# Altium schematic symbol library Resistor.SchLib: 1085 symbols (part 22 of 29)
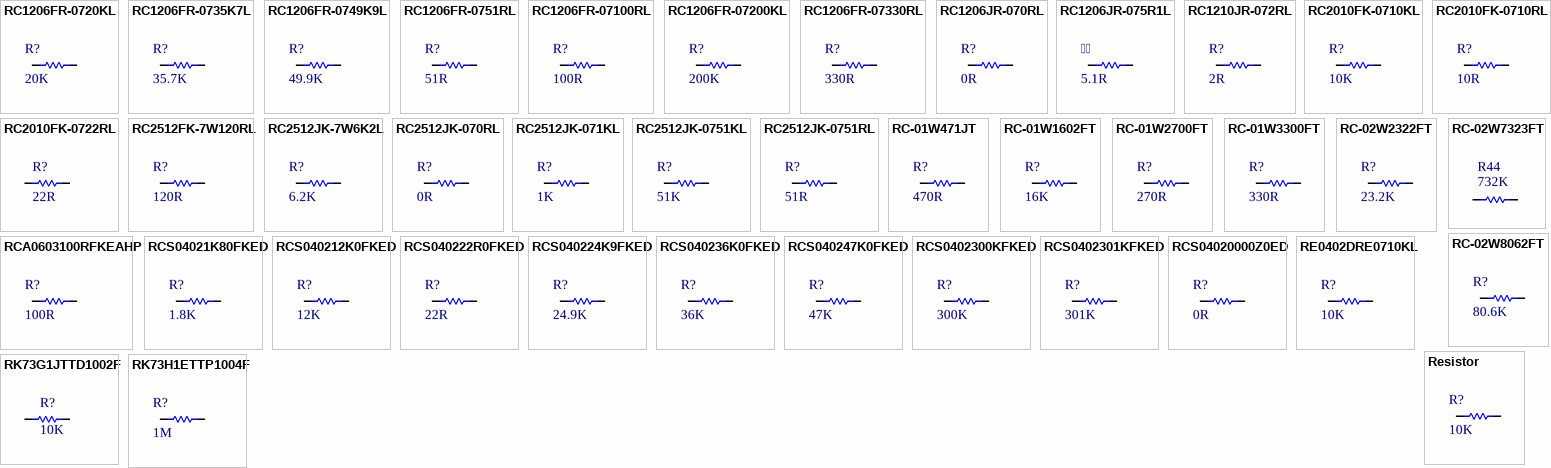
[diagram p48: symbols RC1206FR-0720KL to RK73H1ETTP1004F]

## RC2010FK-0710RL
designator R?, comment 10R
RES 10 OHM 1% 3/4W 2010; Manufacturer: Yageo; Manufacturer Part Number: RC2010FK-0710RL; Item Type: Resistors; Supplier: Future Electronics; LCSC Part Number: C137067; RoHS: Yes; Stock: 8000; Pricing: 4000=0.041, 12000=0.0395, 20000=0.0388, 60000=0.0374, 100000=0.0362 (USD); ComponentLink1URL: https://datasheet.ciiva.com/12667/pyu-rc2010-51-rohs-l-4-12667047.pdf?src-supplier=Mouser; ComponentLink1Description: https://datasheet.ciiva.com/12667/pyu-rc2010-51-rohs-l-4-12667047.pdf?src-supplier=Mouser; ComponentLink2URL: https://datasheet.ciiva.com/7672/1563630-7672315.pdf?src-supplier=Element14; ComponentLink2Description: https://datasheet.ciiva.com/7672/1563630-7672315.pdf?src-supplier=Element14; ComponentLink3URL: https://datasheet.ciiva.com/7672/1563630-7672316.pdf?src-supplier=Element14; ComponentLink3Description: https://datasheet.ciiva.com/7672/1563630-7672316.pdf?src-supplier=Element14; ComponentLink4URL: https://datasheet.ciiva.com/17422/pyu-rc2010-51-rohs-l-4-17422060.pdf?src-supplier=Future+Electronics; ComponentLink4Description: https://datasheet.ciiva.com/17422/pyu-rc2010-51-rohs-l-4-17422060.pdf?src-supplier=Future+Electronics
footprint RES-2010
pins: 1, 2

## RC2010FK-0722RL
designator R?, comment 22R
RES 22 OHM 1% 3/4W 2010; Manufacturer: Yageo; Manufacturer Part Number: RC2010FK-0722RL; Supplier: Digikey; Supplier Part Number: 13-RC2010FK-0722RLCT-ND; RoHS: Yes; Category: Chip SMD Resistors; Stock: 4110; Pricing: 1=0.22, 10=0.082, 50=0.0668, 100=0.052, 500=0.04386, 1000=0.0357 (USD); ComponentLink1URL: https://datasheet.ciiva.com/23789/442877-23789760.pdf?src-supplier=Newark; ComponentLink1Description: https://datasheet.ciiva.com/23789/442877-23789760.pdf?src-supplier=Newark; ComponentLink2URL: https://datasheet.ciiva.com/7672/1563630-7672331.pdf?src-supplier=Element14; ComponentLink2Description: https://datasheet.ciiva.com/7672/1563630-7672331.pdf?src-supplier=Element14; ComponentLink3URL: https://datasheet.ciiva.com/7672/1563630-7672332.pdf?src-supplier=Element14; ComponentLink3Description: https://datasheet.ciiva.com/7672/1563630-7672332.pdf?src-supplier=Element14; ComponentLink4URL: https://datasheet.ciiva.com/8890/pyu-rc2010-51-rohs-l-4-8890167.pdf?src-supplier=Avnet; ComponentLink4Description: https://datasheet.ciiva.com/8890/pyu-rc2010-51-rohs-l-4-8890167.pdf?src-supplier=Avnet
footprint RES-2010
pins: 1, 2

## RC2512FK-7W120RL
designator R?, comment 120R
RES 120 OHM 1% 2W 2512
footprint RES-2512
pins: 1, 2

## RC2512JK-7W6K2L
designator R?, comment 6.2K
RES 6.2K OHM 5% 2W 2512; Manufacturer: Yageo; Manufacturer Part Number: RC2512JK-7W6K2L; Item Type: Resistors; Supplier: Digikey; LCSC Part Number: C136991; RoHS: Yes; Pricing: 4000=0.07843 (USD)
footprint RES-2512
pins: 1, 2

## RC2512JK-070RL
designator R?, comment 0R
RES 0 OHM JUMPER 1W 2512; Manufacturer: Yageo; Manufacturer Part Number: RC2512JK-070RL; Item Type: Resistor; Supplier: Digikey; LCSC Part Number: C189505; RoHS: Yes; Stock: 90391; Pricing: 1=0.31, 10=0.251, 25=0.192, 50=0.1392, 100=0.0979, 250=0.0792, 500=0.0624, 1000=0.0432 (USD); Lead Free: 5697LeadFree; ComponentLink1URL: https://datasheet.ciiva.com/7672/1699814-7672026.pdf?src-supplier=Element14; ComponentLink1Description: https://datasheet.ciiva.com/7672/1699814-7672026.pdf?src-supplier=Element14; ComponentLink2URL: https://datasheet.ciiva.com/7672/1699814-7672027.pdf?src-supplier=Element14; ComponentLink2Description: https://datasheet.ciiva.com/7672/1699814-7672027.pdf?src-supplier=Element14; ComponentLink3URL: https://datasheet.ciiva.com/17205/pyu-rc2512-51-rohs-l-4-17205257.pdf?src-supplier=Future+Electronics; ComponentLink3Description: https://datasheet.ciiva.com/17205/pyu-rc2512-51-rohs-l-4-17205257.pdf?src-supplier=Future+Electronics
footprint RES-2512
pins: 1, 2

## RC2512JK-071KL
designator R?, comment 1K
RES 1K OHM 5% 1W 2512; Manufacturer: Yageo; Manufacturer Part Number: RC2512JK-071KL; Value: 1kR; Voltage Rating: 200V; Temperature Coefficient: 100ppm/°C; Item Type: Resistor; Supplier: Future Electronics; Supplier Part Number: 9067984; RoHS: Yes; Category: Chip SMD Resistors; Stock: 596000; Pricing: 4000=0.0216, 16000=0.0207, 40000=0.0201, 100000=0.0195, 160000=0.0187 (USD); Case/Package: 2512; Case Code (Imperial): 2512; Case Code (Metric): 6432; Contact Plating: Tin,Lead; Min Operating Temperature: -55°C; Max Operating Temperature: 155°C; Power Rating: 1W; Packaging: Tape and Reel; Tolerance: 5%; Resistor Type: Thick Film; Number of Terminations: 2; Termination: SMD/SMT; Max Power Dissipation: 1W; Working Voltage: 200V; Features: Moisture Resistant; Series: RC; Technology: THICK FILM; Resistance Tolerance: 5%; Length: 0.25inch; Width: 3.1mm; Height: 0.026inch; RoHS Compliant: Yes; Reach SVHC Compliant: Unknown; Lead Free: 5697LeadFree; ComponentLink1URL: https://datasheet.ciiva.com/5595/pyu-rc2512-51-rohs-l-4-5595927.pdf?src-supplier=Mouser; ComponentLink1Description: https://datasheet.ciiva.com/5595/pyu-rc2512-51-rohs-l-4-5595927.pdf?src-supplier=Mouser; ComponentLink2URL: https://datasheet.ciiva.com/7672/638316-7672039.pdf?src-supplier=Element14; ComponentLink2Description: https://datasheet.ciiva.com/7672/638316-7672039.pdf?src-supplier=Element14; ComponentLink3URL: https://datasheet.ciiva.com/7672/638316-7672038.pdf?src-supplier=Element14; ComponentLink3Description: https://datasheet.ciiva.com/7672/638316-7672038.pdf?src-supplier=Element14; LCSC Part Number: C137010
footprint RES-2512
pins: 1, 2

## RC2512JK-0751KL
designator R?, comment 51K
RES 51K OHM 5% 1W 2512; Manufacturer: Yageo; Manufacturer Part Number: RC2512JK-0751KL; Item Type: Resistors; Supplier: Mouser; LCSC Part Number: C309618; RoHS: Yes; Stock: 8539; Pricing: 1=0.2, 10=0.092, 50=0.089, 100=0.077, 1000=0.053, 10000=0.03 (USD); ComponentLink1URL: https://datasheet.ciiva.com/12560/pyu-rc2512-51-rohs-l-4-12560603.pdf?src-supplier=Mouser; ComponentLink1Description: https://datasheet.ciiva.com/12560/pyu-rc2512-51-rohs-l-4-12560603.pdf?src-supplier=Mouser
footprint RES-2512
pins: 1, 2

## RC2512JK-0751RL
designator R?, comment 51R
1W Thick Film Resistors 200V ±100ppm/℃ ±5% 51Ω 2512 Chip Resistor - Surface Mount ROHS; Manufacturer: YAGEO; Manufacturer Part Number: RC2512JK-0751RL; Package: 2512; LCSC Part Number: C136999; Item Type: Resistor; ComponentLink1Description: LCSC; ComponentLink1URL: https://www.lcsc.com/product-detail/Chip-Resistor-Surface-Mount_YAGEO-RC2512JK-0751RL_C136999.html
footprint RES-2512
pins: 1, 2

## RC-01W471JT
designator R?, comment 470R
50mW ±5% ±200ppm/℃ 470Ω 0201 Chip Resistor - Surface Mount ROHS; Manufacturer: FH; Manufacturer Part Number: RC-01W471JT; Package: 0201; LCSC Part Number: C304545; Item Type: Resistor; ComponentLink1Description: LCSC; ComponentLink1URL: https://www.lcsc.com/product-detail/Chip-Resistor-Surface-Mount_FH-Guangdong-Fenghua-Advanced-Tech-RC-01W471JT_C304545.html
footprint Res-0201
pins: 1, 2

## RC-01W1602FT
designator R?, comment 16K
50mW Thick Film Resistors 25V ±1% ±200ppm/℃ 16kΩ 0201 Chip Resistor - Surface Mount ROHS; Manufacturer: FH (Guangdong Fenghua Advanced Tech); Manufacturer Part Number: RC-01W1602FT; Package: 0201; LCSC Part Number: C320708; Item Type: Resistor; ComponentLink1Description: LCSC; ComponentLink1URL: https://www.lcsc.com/product-detail/Chip-Resistor-Surface-Mount_FH-Guangdong-Fenghua-Advanced-Tech-RC-01W1602FT_C320708.html
footprint Res-0201
pins: 1, 2

## RC-01W2700FT
designator R?, comment 270R
50mW Thick Film Resistors 25V ±1% ±200ppm/℃ 270Ω 0201 Chip Resistor - Surface Mount ROHS; Manufacturer: FH (Guangdong Fenghua Advanced Tech); Manufacturer Part Number: RC-01W2700FT; Package: 0201; LCSC Part Number: C320795; Item Type: Resistor; ComponentLink1Description: LCSC; ComponentLink1URL: https://www.lcsc.com/product-detail/Chip-Resistor-Surface-Mount_FH-Guangdong-Fenghua-Advanced-Tech-RC-01W2700FT_C320795.html
footprint Res-0201
pins: 1, 2

## RC-01W3300FT
designator R?, comment 330R
50mW ±1% ±200ppm/℃ 330Ω 0201 Chip Resistor - Surface Mount ROHS; Manufacturer: FH; Manufacturer Part Number: RC-01W3300FT; Footprint: 0201; ComponentLink1Description: LCSC; ComponentLink1URL: https://www.lcsc.com/product-detail/Chip-Resistor-Surface-Mount_FH-Guangdong-Fenghua-Advanced-Tech-RC-01W3300FT_C320833.html; LCSC Part Number: C320833; Item Type: Resistor
footprint Res-0201
pins: 1, 2

## RC-02W2322FT
designator R?, comment 23.2K
62.5mW Thick Film Resistors 50V ±1% ±200ppm/℃ 23.2kΩ 0402 Chip Resistor - Surface Mount ROHS; Manufacturer: FH; Manufacturer Part Number: RC-02W2322FT; Package: 0402; LCSC Part Number: C321384; Item Type: Resistor; ComponentLink1Description: JLCPCB; ComponentLink1URL: https://jlcpcb.com/partdetail/302289-RC02W2322FT/C321384
footprint Res-0402
pins: 1, 2

## RC-02W7323FT
designator R44, comment 732K
62.5mW Thick Film Resistors ±1% ±200ppm/℃ 732kΩ 0402 Chip Resistor - Surface Mount ROHS; Manufacturer: FH (Guangdong Fenghua Advanced Tech); Manufacturer Part Number: RC-02W7323FT; Package: Res-0402; JLCPCB Part Number: C321608; Item Type: Resistor
footprint Res-0402
pins: 1, 2

## RC-02W8062FT
designator R?, comment 80.6K
1/16W 50V ±1% ±200ppm/℃ -55℃~+155℃ 80.6kΩ 0402 Chip Resistor - Surface Mount ROHS; Manufacture Part Number: RC-02W8062FT; Manufacturer: FH; Footprint: 0402; Value: 80.6K; ComponentLink1Description: LCSC; ComponentLink1URL: https://www.lcsc.com/product-detail/Chip-Resistor-Surface-Mount_FH-Guangdong-Fenghua-Advanced-Tech-RC-02W8062FT_C304637.html; LCSC Part Number: C304637; Item Type: Resistor
footprint Res-0402
pins: 1, 2

## RCA0603100RFKEAHP
designator R?, comment 100R
RES SMD 100 OHM 1% 1/4W 0603; Manufacturer: Vishay Dale; Manufacturer Part Number: RCA0603100RFKEAHP; Max Power Dissipation: 250mW; Temperature Coefficient: 100ppm/°C; Supplier 1: Digi-Key; Stock 1: 0; Case/Package: 0603; Case Code (Imperial): 0603; Case Code (Metric): 1608; Min Operating Temperature: -55°C; Max Operating Temperature: 155°C; Resistor Type: Thick Film; Features: Automotive AEC-Q200,Anti-Sulfur; Packaging: Tape and Reel; Resistance: 100R; Tolerance: 1%; Number of Terminations: 2; RoHS Compliant: Yes; ComponentLink1URL: http://www.vishay.com/docs/20067/rcahp.pdf?src-supplier=Digi-Key; ComponentLink1Description: http://www.vishay.com/docs/20067/rcahp.pdf?src-supplier=Digi-Key; Supplier Part Number 1: 541-3244-2-ND; LCSC Part Number: C2074203
footprint RES-0603
footprint Res-0603
pins: 1, 2

## RCS04021K80FKED
designator R?, comment 1.8K
RES SMD 1.8K OHM 1% 1/5W 0402; Manufacturer: Vishay Dale; Manufacturer Part Number: RCS04021K80FKED; Resistance: 1.8kR; Max Power Dissipation: 200mW; Temperature Coefficient: 100ppm/°C; Supplier 1: Digi-Key; Stock 1: 1940; Pricing 1: 1=0.12, 10=0.105, 100=0.0402, 1000=0.01771, 2500=0.0153, 5000=0.01368 (USD); Case/Package: 0402; Min Operating Temperature: -55°C; Max Operating Temperature: 155°C; Package Quantity: 10000; Packaging: Tape and Reel; Resistor Type: Thick Film; Number of Terminations: 2; Tolerance: 1%; Features: Automotive AEC-Q200; Length: 0.039inch; Width: 0.02inch; Height: 0.016inch; ComponentLink1URL: http://www.vishay.com/docs/20065/rcse3.pdf?src-supplier=Digi-Key; ComponentLink1Description: http://www.vishay.com/docs/20065/rcse3.pdf?src-supplier=Digi-Key; Supplier Part Number 1: 541-RCS04021K80FKEDDKR-ND; LCSC Part Number: C1881088
footprint Res-0402
pins: 1, 2

## RCS040212K0FKED
designator R?, comment 12K
RES SMD 12K OHM 1% 1/5W 0402; Manufacturer: Vishay Dale; Manufacturer Part Number: RCS040212K0FKED; Resistance: 12kR; Max Power Dissipation: 200mW; Temperature Coefficient: 100ppm/°C; Supplier 1: Digi-Key; Stock 1: 8335; Pricing 1: 1=0.12, 10=0.105, 100=0.0402, 1000=0.01771, 2500=0.0153, 5000=0.01368 (USD); Case/Package: 0402; Min Operating Temperature: -55°C; Max Operating Temperature: 155°C; Package Quantity: 10000; Packaging: Tape and Reel; Resistor Type: Thick Film; Number of Terminations: 2; Tolerance: 1%; Features: Automotive AEC-Q200; Length: 0.039inch; Width: 0.02inch; Height: 0.016inch; ComponentLink1URL: http://www.farnell.com/datasheets/2848043.pdf?src-supplier=Farnell; ComponentLink1Description: http://www.farnell.com/datasheets/2848043.pdf?src-supplier=Farnell; ComponentLink2URL: http://www.farnell.com/datasheets/2848043.pdf?src-supplier=Newark; ComponentLink2Description: http://www.farnell.com/datasheets/2848043.pdf?src-supplier=Newark; ComponentLink3URL: http://www.vishay.com/docs/20065/rcse3.pdf?src-supplier=Digi-Key; ComponentLink3Description: http://www.vishay.com/docs/20065/rcse3.pdf?src-supplier=Digi-Key; Supplier Part Number 1: 541-10388-1-ND; LCSC Part Number: C2100716
footprint Res-0402
pins: 1, 2

## RCS040222R0FKED
designator R?, comment 22R
RES SMD 22 OHM 1% 1/5W 0402; Manufacturer: Vishay Dale; Manufacturer Part Number: RCS040222R0FKED; Max Power Dissipation: 200mW; Temperature Coefficient: 100ppm/°C; Supplier 1: Digi-Key; Stock 1: 8456; Pricing 1: 1=0.12, 10=0.105, 100=0.0402, 1000=0.01771, 2500=0.0153, 5000=0.01368 (USD); Case/Package: 0402; Case Code (Metric): 1005; Case Code (Imperial): 0402; Min Operating Temperature: -55°C; Max Operating Temperature: 155°C; Packaging: Tape and Reel; Resistance: 22R; Resistor Type: Thick Film; Number of Terminations: 2; Tolerance: 1%; Features: Automotive AEC-Q200; Length: 0.039inch; Width: 0.02inch; Height: 0.016inch; RoHS Compliant: Yes; ComponentLink1URL: http://www.vishay.com/docs/20065/rcse3.pdf?src-supplier=Digi-Key; ComponentLink1Description: http://www.vishay.com/docs/20065/rcse3.pdf?src-supplier=Digi-Key; Supplier Part Number 1: 541-2880-1-ND; LCSC Part Number: C2086081
footprint Res-0402
pins: 1, 2

## RCS040224K9FKED
designator R?, comment 24.9K
Res SMD 24.9K Ohm 1% 1/5W 0402; Manufacturer: Vishay Dale; Manufacturer Part Number: RCS040224K9FKED; Value: 24.9kR; Max Power Dissipation: 200mW; Temperature Coefficient: 100ppm/°C; Item Type: Resistor; Supplier 1: Digi-Key; RoHS: Yes; Category: Chip SMD Resistors; Stock 1: 19390; Pricing 1: 1=0.1, 10=0.092, 50=0.0494, 100=0.0354, 500=0.02192, 1000=0.01555, 5000=0.01202 (USD); Case/Package: 0402; Min Operating Temperature: -55°C; Max Operating Temperature: 155°C; Package Quantity: 10000; Packaging: Tape and Reel; Number of Terminations: 2; Tolerance: 1%; Features: Automotive AEC-Q200; Series: RCS; Length: 0.039inch; Width: 0.02inch; Height: 0.016inch; ComponentLink1URL: http://www.vishay.com/docs/20065/rcse3.pdf?src-supplier=Digi-Key; ComponentLink1Description: http://www.vishay.com/docs/20065/rcse3.pdf?src-supplier=Digi-Key; Supplier Part Number 1: 541-RCS040224K9FKEDCT-ND; LCSC Part Number: C1881100
footprint Res-0402
pins: 1, 2

## RCS040236K0FKED
designator R?, comment 36K
RES SMD 36K OHM 1% 1/5W 0402; Manufacturer: Vishay Dale; Manufacturer Part Number: RCS040236K0FKED; Resistance: 36kR; Max Power Dissipation: 200mW; Temperature Coefficient: 100ppm/°C; Supplier 1: Digi-Key; Stock 1: 9900; Pricing 1: 1=0.12, 10=0.105, 100=0.0402, 1000=0.01771, 2500=0.0153, 5000=0.01368 (USD); Case/Package: 0402; Min Operating Temperature: -55°C; Max Operating Temperature: 155°C; Package Quantity: 10000; Packaging: Tape and Reel; Resistor Type: Thick Film; Number of Terminations: 2; Tolerance: 1%; Features: Automotive AEC-Q200; Length: 0.039inch; Width: 0.02inch; Height: 0.016inch; RoHS Compliant: Yes; ComponentLink1URL: http://www.vishay.com/docs/20065/rcse3.pdf?src-supplier=Digi-Key; ComponentLink1Description: http://www.vishay.com/docs/20065/rcse3.pdf?src-supplier=Digi-Key; Supplier Part Number 1: 541-RCS040236K0FKEDCT-ND; LCSC Part Number: C1881070
footprint Res-0402
pins: 1, 2

## RCS040247K0FKED
designator R?, comment 47K
RES SMD 47K OHM 1% 1/5W 0402; Manufacturer: Vishay Dale; Manufacturer Part Number: RCS040247K0FKED; Resistance: 47kR; Max Power Dissipation: 200mW; Temperature Coefficient: 100ppm/°C; Supplier 1: Digi-Key; Stock 1: 5377; Pricing 1: 1=0.12, 10=0.105, 100=0.0402, 1000=0.01771, 2500=0.0153, 5000=0.01368 (USD); Case/Package: 0402; Case Code (Metric): 1005; Case Code (Imperial): 0402; Min Operating Temperature: -55°C; Max Operating Temperature: 155°C; Packaging: Tape and Reel; Resistor Type: Thick Film; Number of Terminations: 2; Tolerance: 1%; Features: Automotive AEC-Q200; Length: 0.039inch; Width: 0.02inch; Height: 0.016inch; RoHS Compliant: Yes; ComponentLink1URL: http://www.vishay.com/docs/20065/rcse3.pdf?src-supplier=Digi-Key; ComponentLink1Description: http://www.vishay.com/docs/20065/rcse3.pdf?src-supplier=Digi-Key; Supplier Part Number 1: 541-2897-1-ND
footprint Res-0402
pins: 1, 2

## RCS0402300KFKED
designator R?, comment 300K
RES SMD 300K OHM 1% 1/5W 0402; Manufacturer: Vishay Dale; Manufacturer Part Number: RCS0402300KFKED; Resistance: 300kR; Max Power Dissipation: 200mW; Temperature Coefficient: 100ppm/°C; Supplier 1: Digi-Key; Stock 1: 9042; Pricing 1: 1=0.12, 10=0.105, 100=0.0402, 1000=0.01771, 2500=0.0153, 5000=0.01368 (USD); Case/Package: 0402; Min Operating Temperature: -55°C; Max Operating Temperature: 155°C; Package Quantity: 10000; Packaging: Tape and Reel; Resistor Type: Thick Film; Number of Terminations: 2; Tolerance: 1%; Features: Automotive AEC-Q200; Length: 0.039inch; Width: 0.02inch; Height: 0.016inch; RoHS Compliant: Yes; ComponentLink1URL: http://www.vishay.com/docs/20065/rcse3.pdf?src-supplier=Digi-Key; ComponentLink1Description: http://www.vishay.com/docs/20065/rcse3.pdf?src-supplier=Digi-Key; Supplier Part Number 1: 541-RCS0402300KFKEDDKR-ND; LCSC Part Number: C1881124
footprint Res-0402
pins: 1, 2

## RCS0402301KFKED
designator R?, comment 301K
RES SMD 301K OHM 1% 1/5W 0402; Manufacturer: Vishay Dale; Manufacturer Part Number: RCS0402301KFKED; Resistance: 301kR; Max Power Dissipation: 200mW; Temperature Coefficient: 100ppm/°C; Supplier 1: Digi-Key; Stock 1: 10000; Pricing 1: 1=0.11, 10=0.1, 100=0.0385, 1000=0.01694, 2500=0.01463, 5000=0.01309 (USD); Case/Package: 0402; Min Operating Temperature: -55°C; Max Operating Temperature: 155°C; Package Quantity: 10000; Packaging: Tape and Reel; Resistor Type: Thick Film; Number of Terminations: 2; Tolerance: 1%; Features: Automotive AEC-Q200; Length: 0.039inch; Width: 0.02inch; Height: 0.016inch; ComponentLink1URL: http://www.vishay.com/docs/20065/rcse3.pdf?src-supplier=Digi-Key; ComponentLink1Description: http://www.vishay.com/docs/20065/rcse3.pdf?src-supplier=Digi-Key; Supplier Part Number 1: 541-RCS0402301KFKEDCT-ND; LCSC Part Number: C1881123
footprint Res-0402
pins: 1, 2

## RCS04020000Z0ED
designator R?, comment 0R
RES SMD 0 OHM JUMPER 1/5W 0402; Manufacturer: Vishay Dale; Manufacturer Part Number: RCS04020000Z0ED; Resistance: 0mR; Max Power Dissipation: 200mW; Item Type: Resistor; Supplier 1: Digi-Key; Stock 1: 35470; Pricing 1: 1=0.1, 10=0.083, 25=0.0576, 50=0.0448, 100=0.032, 250=0.02496, 500=0.01984, 1000=0.01408, 5000=0.01088 (USD); Case/Package: 0402; Case Code (Metric): 1005; Case Code (Imperial): 0402; Min Operating Temperature: -55°C; Max Operating Temperature: 155°C; Packaging: Tape and Reel; Resistor Type: Thick Film; Number of Terminations: 2; Features: Automotive AEC-Q200; Length: 0.039inch; Width: 0.02inch; Height: 0.016inch; RoHS Compliant: Yes; ComponentLink1URL: http://www.farnell.com/datasheets/2618474.pdf?src-supplier=Farnell; ComponentLink1Description: http://www.farnell.com/datasheets/2618474.pdf?src-supplier=Farnell; ComponentLink2URL: http://www.farnell.com/datasheets/2618474.pdf?src-supplier=Element14; ComponentLink2Description: http://www.farnell.com/datasheets/2618474.pdf?src-supplier=Element14; ComponentLink3URL: http://www.vishay.com/docs/20065/rcse3.pdf?src-supplier=Digi-Key; ComponentLink3Description: http://www.vishay.com/docs/20065/rcse3.pdf?src-supplier=Digi-Key; ComponentLink4URL: http://www.farnell.com/datasheets/2618474.pdf?src-supplier=Newark; ComponentLink4Description: http://www.farnell.com/datasheets/2618474.pdf?src-supplier=Newark; Supplier Part Number 1: 541-2877-1-ND; LCSC Part Number: C844673
footprint Res-0402
pins: 1, 2

## RE0402DRE0710KL
designator R?, comment 10K
RES SMD 10K OHM 0.5% 1/16W 0402; Manufacturer: Yageo; Manufacturer Part Number: RE0402DRE0710KL; Value: 10kR; Max Power Dissipation: 63mW; Temperature Coefficient: 50ppm/°C; Item Type: Resistor; Supplier: Future Electronics; Supplier Part Number: 8132697; RoHS: Yes; Category: Chip SMD Resistors; Stock: 10000; Pricing: 10000=0.0059, 40000=0.0056, 150000=0.0053, 250000=0.0052, 500000=0.0049 (USD); Case/Package: 0402; Min Operating Temperature: -55°C; Max Operating Temperature: 155°C; Packaging: Tape and Reel; Number of Terminations: 2; Tolerance: 0.5%; Features: Moisture Resistant; Series: RE; Length: 0.039inch; Width: 0.02inch; Height: 0.015inch; RoHS Compliant: Yes; ComponentLink1URL: http://www.yageo.com/NewPortal/yageodocoutput?fileName=/pdf/R-Chip/PYu-RE_105_RoHS_L_6.pdf&src-supplier=Digi-Key; ComponentLink1Description: http://www.yageo.com/NewPortal/yageodocoutput?fileName=/pdf/R-Chip/PYu-RE_105_RoHS_L_6.pdf&src-supplier=Digi-Key; LCSC Part Number: C851874
footprint Res-0402
pins: 1, 2

## Resistor
designator R?, comment 10K
footprint R 0402_L
pins: 1, 2

## RK73G1JTTD1002F
designator R?, comment 10K
RES 10K OHM 1% 1/10W 0603; Manufacturer Part Number: RK73G1JTTD1002F; Manufacturer: KOA Speer; Item Type: Resistor; Value: 10kR; Power Rating: 100mW; Voltage Rating: 75V; Temperature Coefficient: 50ppm/°C; LCSC Part Number: C362180; ComponentLink1Description: LCSC; Supplier: Digi-Key; Category: Chip SMD Resistors; Stock: 249394; Pricing: 1=0.22, 10=0.118, 50=0.0812, 100=0.0699, 500=0.0513, 1000=0.04545 (USD); Case/Package: 0603; Case Code (Imperial): 0603; Case Code (Metric): 1608; Min Operating Temperature: -55°C; Max Operating Temperature: 125°C; Tolerance: 1%; Packaging: Tape and Reel; Termination: SMD/SMT; Series: RK73G; Construction: Rectangular; Length: 1.6mm; Depth: 0.8mm; Military Standard: Not; RoHS Compliant: Yes; ComponentLink2URL: http://www.mouser.com/ds/2/219/RK73G-9863.pdf?src-supplier=Mouser; ComponentLink2Description: http://www.mouser.com/ds/2/219/RK73G-9863.pdf?src-supplier=Mouser
footprint Res-0603
pins: 1, 2

## RK73H1ETTP1004F
designator R?, comment 1M
Res Thick Film 0402 1M Ohm 1% 0.1W(1/10W) ±100ppm/C Pad SMD Automotive T/R; Manufacturer: KOA Speer; Manufacturer Part Number: RK73H1ETTP1004F; Resistance: 1MR; Power Rating: 63mW; Voltage Rating: 50V; Temperature Coefficient: 100ppm/°C; Max Power Dissipation: 100mW; Item Type: Resistor; Supplier 1: Rs; RoHS: Yes; Category: Chip SMD Resistors; Stock 1: 29500; Pricing 1: 100=0.003, 1000=0.006, 2500=0.005, 5000=0.005, 10000=0.004 (GBP); Mount: Surface Mount; Case/Package: 0402; Case Code (Imperial): 0402; Case Code (Metric): 1005; Min Operating Temperature: -55°C; Max Operating Temperature: 155°C; Packaging: Tape and Reel; Tolerance: 1%; Package Quantity: 10000; Termination: SMD/SMT; Series: RK73H; Construction: Rectangular; Technology: THICK FILM; Features: Moisture Resistant,Automotive AEC-Q200; Number of Terminations: 2; Voltage Rating (DC): 50V; Length: 1mm; Width: 0.5mm; Height: 0.35mm; Depth: 0.5mm; Ratings: AEC-Q200; Military Standard: Not; RoHS Compliant: Yes; Lead Free: 5697LeadFree; ComponentLink1URL: http://www.jameco.com/Jameco/Products/ProdDS/1882463.pdf?src-supplier=Jameco; ComponentLink1Description: http://www.jameco.com/Jameco/Products/ProdDS/1882463.pdf?src-supplier=Jameco; ComponentLink2URL: http://components.arrow.com/part/dataview/39721833S6492602N5146?src-supplier=Arrow+Electronics; ComponentLink2Description: http://components.arrow.com/part/dataview/39721833S6492602N5146?src-supplier=Arrow+Electronics; ComponentLink3URL: https://datasheet.octopart.com/RK73H1ETTP1004F-KOA-Speer-datasheet-149653815.pdf?src-supplier=Farnell; ComponentLink3Description: https://datasheet.octopart.com/RK73H1ETTP1004F-KOA-Speer-datasheet-149653815.pdf?src-supplier=Farnell; ComponentLink4URL: http://www.koaspeer.com/catimages/Products/RK73H/RK73H.pdf?src-supplier=Mouser; ComponentLink4Description: http://www.koaspeer.com/catimages/Products/RK73H/RK73H.pdf?src-supplier=Mouser; ComponentLink5URL: https://www.verical.com/server-webapp/html/getDatasheet?partID=139303&src-supplier=Verical; ComponentLink5Description: https://www.verical.com/server-webapp/html/getDatasheet?partID=139303&src-supplier=Verical; LCSC Part Number: C159943
footprint Res-0402
pins: 1, 2

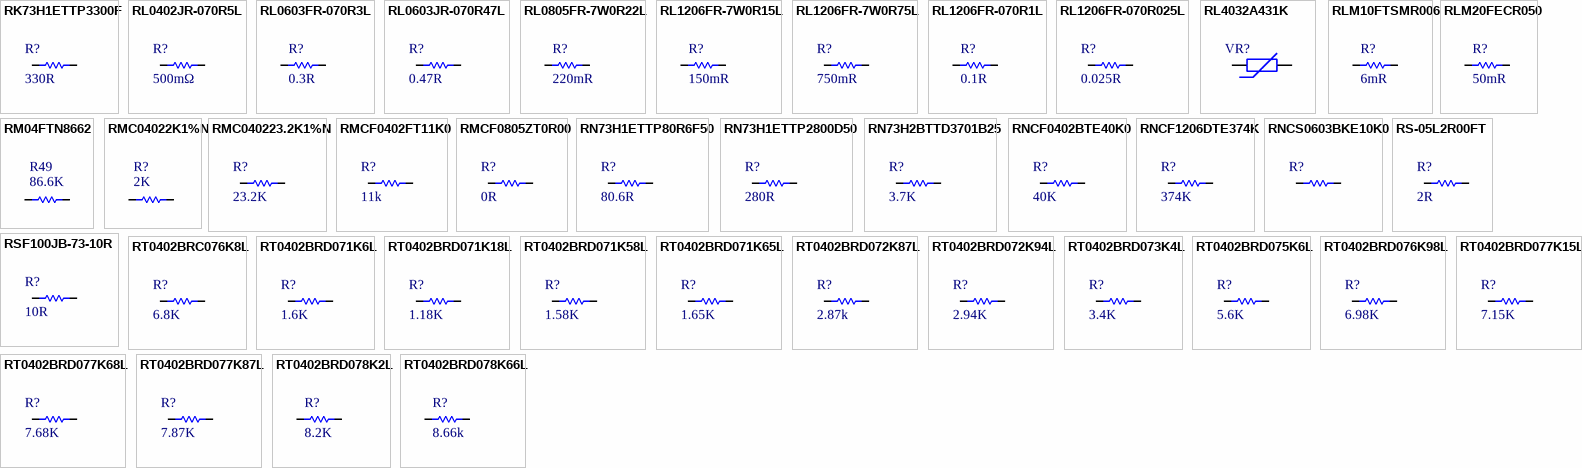
[diagram p20: symbols RK73H1ETTP3300F to RT0402BRD078K66L]

## RK73H1ETTP3300F
designator R?, comment 330R
RES 330 OHM 1% 1/10W 0402; Manufacturer: KOA Speer; Manufacturer Part Number: RK73H1ETTP3300F; Power Rating: 63mW; Voltage Rating: 50V; Temperature Coefficient: 100ppm/°C; Max Power Dissipation: 100mW; Supplier: Rs; Supplier Part Number: 6317972; RoHS: Yes; Category: Chip SMD Resistors; Stock: 36500; Pricing: 100=0.007, 1000=0.006, 2500=0.006, 5000=0.006, 10000=0.005 (GBP); Case/Package: 0402; Case Code (Imperial): 0402; Case Code (Metric): 1005; Min Operating Temperature: -55°C; Max Operating Temperature: 155°C; Value: 330R; Tolerance: 1%; Packaging: Tape and Reel; Package Quantity: 10000; Termination: SMD/SMT; Voltage Rating (DC): 50V; Series: RK73H; Construction: Rectangular; Features: Moisture Resistant,Automotive AEC-Q200; Number of Terminations: 2; Length: 1mm; Width: 0.5mm; Height: 0.35mm; LCSC Part Number: C159971; Ratings: AEC-Q200; Military Standard: Not; Lead Free: Lead Free; RoHS Compliant: Yes; ComponentLink1URL: https://datasheet.ciiva.com/5555/rk73h-5555909.pdf?src-supplier=Mouser; ComponentLink1Description: https://datasheet.ciiva.com/5555/rk73h-5555909.pdf?src-supplier=Mouser; ComponentLink2URL: https://datasheet.ciiva.com/15203/getdatasheetpartid-424481-15203100.pdf?src-supplier=Verical; ComponentLink2Description: https://datasheet.ciiva.com/15203/getdatasheetpartid-424481-15203100.pdf?src-supplier=Verical
footprint Res-0402
pins: 1, 2

## RL0402JR-070R5L
designator R?, comment 500mΩ
RES 0.5 OHM 5% 1/16W 0402; Manufacturer: Yageo; Manufacturer Part Number: RL0402JR-070R5L; Value: 500mR; Max Power Dissipation: 63mW; Temperature Coefficient: 300ppm/°C; Item Type: Resistor; Supplier: Mouser; Supplier Part Number: 603-RL0402JR-070R5L; RoHS: Yes; Category: Chip SMD Resistors; Stock: 18660; Pricing: 1=0.19, 10=0.127, 50=0.127, 100=0.063, 1000=0.027, 10000=0.02 (USD); Case/Package: 0402; Min Operating Temperature: -55°C; Max Operating Temperature: 155°C; Packaging: Tape and Reel; Number of Terminations: 2; Tolerance: 5%; Features: Moisture Resistant; Series: RL; Length: 0.039inch; Width: 0.02inch; Height: 0.016inch; RoHS Compliant: Yes; ComponentLink1URL: http://www.mouser.com/ds/2/447/PYu-RL_521_RoHS_L_5-2927.pdf?src-supplier=Mouser; ComponentLink1Description: http://www.mouser.com/ds/2/447/PYu-RL_521_RoHS_L_5-2927.pdf?src-supplier=Mouser; ComponentLink2URL: http://www.yageo.com/documents/recent/PYu-RL_Group_521_RoHS_L_2.pdf?src-supplier=Digikey; ComponentLink2Description: http://www.yageo.com/documents/recent/PYu-RL_Group_521_RoHS_L_2.pdf?src-supplier=Digikey; LCSC Part Number: C852207
footprint Res-0402
pins: 1, 2

## RL0603FR-070R3L
designator R?, comment 0.3R
RES 0.3 OHM 1% 1/10W 0603; Manufacturer: Yageo; Manufacturer Part Number: RL0603FR-070R3L; Item Type: Resistor; Value: 300mR; Max Power Dissipation: 100mW; Temperature Coefficient: 800ppm/°C; Supplier: Digikey; Supplier Part Number: 13-RL0603FR-070R3LCT-ND; RoHS: Yes; Stock: 13643; Pricing: 1=0.24, 10=0.125, 50=0.0854, 100=0.0736, 500=0.054, 1000=0.04784 (USD); Case/Package: 0603; Min Operating Temperature: -55°C; Max Operating Temperature: 155°C; Packaging: Tape and Reel; Number of Terminations: 2; Tolerance: 1%; Features: Moisture Resistant; Series: RL; Length: 0.063inch; Width: 0.031inch; Height: 0.022inch; RoHS Compliant: Yes; ComponentLink1URL: http://www.mouser.com/ds/2/447/PYu-RL_521_RoHS_L_5-2927.pdf?src-supplier=Mouser; ComponentLink1Description: http://www.mouser.com/ds/2/447/PYu-RL_521_RoHS_L_5-2927.pdf?src-supplier=Mouser; ComponentLink2URL: http://www.yageo.com/documents/recent/PYu-RL_Group_521_RoHS_L_2.pdf?src-supplier=Digikey; ComponentLink2Description: http://www.yageo.com/documents/recent/PYu-RL_Group_521_RoHS_L_2.pdf?src-supplier=Digikey
footprint Res-0603
pins: 1, 2

## RL0603JR-070R47L
designator R?, comment 0.47R
RES 0.47 OHM 5% 1/10W 0603; Manufacturer: Yageo; Manufacturer Part Number: RL0603JR-070R47L; Item Type: Resistor; Supplier: Digikey; LCSC Part Number: C705484; RoHS: Yes; Stock: 1845; Pricing: 1=0.13, 10=0.044, 50=0.0392, 100=0.0347, 500=0.03264, 1000=0.02958 (USD); ComponentLink1URL: https://datasheet.ciiva.com/14983/pyu-rl-group-521-rohs-l-0-14983432.pdf?src-supplier=Digikey; ComponentLink1Description: https://datasheet.ciiva.com/14983/pyu-rl-group-521-rohs-l-0-14983432.pdf?src-supplier=Digikey; ComponentLink2URL: https://datasheet.ciiva.com/17055/pyu-rl-521-rohs-l-5-17055645.pdf?src-supplier=Future+Electronics; ComponentLink2Description: https://datasheet.ciiva.com/17055/pyu-rl-521-rohs-l-5-17055645.pdf?src-supplier=Future+Electronics
footprint Res-0603
pins: 1, 2

## RL0805FR-7W0R22L
designator R?, comment 220mR
RES 0.22 OHM 1% 1/4W 0805; Manufacturer: Yageo; Manufacturer Part Number: RL0805FR-7W0R22L; Item Type: Resistor; Supplier: Arrow Electronics; LCSC Part Number: C859802; RoHS: Yes; Stock: 1105; Pricing: 1=0.2652, 10=0.0965, 25=0.095, 100=0.0617, 250=0.0611, 500=0.0584, 1000=0.0414 (USD); ComponentLink1URL: https://datasheet.ciiva.com/2480/pyu-r-int-thick-7-2480318.pdf?src-supplier=Digikey; ComponentLink1Description: https://datasheet.ciiva.com/2480/pyu-r-int-thick-7-2480318.pdf?src-supplier=Digikey; ComponentLink2URL: https://datasheet.ciiva.com/2480/pyu-r-int-thick-7-2480319.pdf?src-supplier=Digikey; ComponentLink2Description: https://datasheet.ciiva.com/2480/pyu-r-int-thick-7-2480319.pdf?src-supplier=Digikey; ComponentLink3URL: https://datasheet.ciiva.com/2480/pyu-r-int-thick-7-2480320.pdf?src-supplier=Digikey; ComponentLink3Description: https://datasheet.ciiva.com/2480/pyu-r-int-thick-7-2480320.pdf?src-supplier=Digikey; ComponentLink4URL: https://datasheet.ciiva.com/7942/1693483-7942060.pdf?src-supplier=Element14; ComponentLink4Description: https://datasheet.ciiva.com/7942/1693483-7942060.pdf?src-supplier=Element14; ComponentLink5URL: https://datasheet.ciiva.com/7942/1693483-7942061.pdf?src-supplier=Element14; ComponentLink5Description: https://datasheet.ciiva.com/7942/1693483-7942061.pdf?src-supplier=Element14
footprint RES-0805 (SMD 0805)
pins: 1, 2

## RL1206FR-7W0R15L
designator R?, comment 150mR
RES 0.15 OHM 1% 1/2W 1206; Manufacturer: YAGEO; Manufacturer Part Number: RL1206FR-7W0R15L; Item Type: Resistor; Package: 1206; LCSC Part Number: C859925; ComponentLink1Description: LCSC; ComponentLink1URL: https://www.lcsc.com/product-detail/Chip-Resistor-Surface-Mount_YAGEO-RL1206FR-7W0R15L_C859925.html
footprint Res-1206
pins: 1, 2

## RL1206FR-7W0R75L
designator R?, comment 750mR
RES 0.75 OHM 1% 1/2W 1206; Manufacturer: Yageo; Manufacturer Part Number: RL1206FR-7W0R75L; Item Type: Resistors; Supplier: Digikey; LCSC Part Number: C859938; RoHS: Yes; Stock: 5438; Pricing: 1=0.36, 10=0.095, 100=0.0857, 1000=0.0765, 2500=0.07497 (USD); ComponentLink1URL: http://www.mouser.com/ds/2/447/PYu-RL_Group_521_RoHS_L_2-1131815.pdf?src-supplier=Mouser; ComponentLink1Description: http://www.mouser.com/ds/2/447/PYu-RL_Group_521_RoHS_L_2-1131815.pdf?src-supplier=Mouser; ComponentLink2URL: https://www.yageo.com/upload/media/product/productsearch/datasheet/rchip/PYu-RL_Group_521_RoHS_L_2.pdf?src-supplier=Digikey; ComponentLink2Description: https://www.yageo.com/upload/media/product/productsearch/datasheet/rchip/PYu-RL_Group_521_RoHS_L_2.pdf?src-supplier=Digikey; ComponentLink3URL: http://www.yageo.com/exep/pages/download/literatures/R-chip_current%20sensor_20140512.pdf?src-supplier=Digikey; ComponentLink3Description: http://www.yageo.com/exep/pages/download/literatures/R-chip_current%20sensor_20140512.pdf?src-supplier=Digikey; ComponentLink4URL: https://datasheet.octopart.com/RL1206FR-7W0R75L-Yageo-datasheet-83209227.pdf?src-supplier=Future+Electronics; ComponentLink4Description: https://datasheet.octopart.com/RL1206FR-7W0R75L-Yageo-datasheet-83209227.pdf?src-supplier=Future+Electronics
footprint Res-1206
pins: 1, 2

## RL1206FR-070R1L
designator R?, comment 0.1R
RES 0.1 OHM 1% 1/4W 1206; Manufacturer: Yageo; Manufacturer Part Number: RL1206FR-070R1L; Item Type: Resistor; Supplier: Future Electronics; Supplier Part Number: 1607134; RoHS: Yes; Stock: 10000; Pricing: 5000=0.0214, 15000=0.02, 20000=0.0205, 25000=0.0197, 75000=0.0197, 125000=0.0184, 150000=0.0193, 375000=0.0184 (USD); Lead Free: 5697LeadFree; ComponentLink1URL: https://datasheet.ciiva.com/22699/877049-22699038.pdf?src-supplier=Element14; ComponentLink1Description: https://datasheet.ciiva.com/22699/877049-22699038.pdf?src-supplier=Element14; ComponentLink2URL: https://datasheet.ciiva.com/5558/pyu-rl-hp-521-rohs-l-2-5558071.pdf?src-supplier=Mouser; ComponentLink2Description: https://datasheet.ciiva.com/5558/pyu-rl-hp-521-rohs-l-2-5558071.pdf?src-supplier=Mouser
footprint Res-1206
pins: 1, 2

## RL1206FR-070R025L
designator R?, comment 0.025R
RES 0.025 OHM 1% 1/4W 1206; Manufacturer: Yageo; Manufacturer Part Number: RL1206FR-070R025L; Item Type: Resistors; Supplier: Future Electronics; LCSC Part Number: C326782; RoHS: Yes; Stock: 10000; Pricing: 5000=0.0693, 10000=0.0682, 20000=0.0672, 25000=0.0668, 75000=0.0648 (USD); Lead Free: 5697LeadFree; ComponentLink1URL: https://datasheet.ciiva.com/15329/pyu-rl-521-rohs-l-5-15329020.pdf?src-supplier=Mouser; ComponentLink1Description: https://datasheet.ciiva.com/15329/pyu-rl-521-rohs-l-5-15329020.pdf?src-supplier=Mouser; ComponentLink2URL: https://datasheet.ciiva.com/8889/pyu-rl-521-rohs-l-5-8889981.pdf?src-supplier=Avnet; ComponentLink2Description: https://datasheet.ciiva.com/8889/pyu-rl-521-rohs-l-5-8889981.pdf?src-supplier=Avnet
footprint Res-1206
pins: 1, 2

## RL4032A431K
designator VR?
710V 350V 275V 387V~473V 4032 Varistors, MOVs RoHS; Manufacturer: RUILON; Manufacturer Part Number: RL4032A431K; Package: 4032; LCSC Part Number: C2935515; Item Type: Varistor; ComponentLink1Description: LCSC; ComponentLink1URL: https://www.lcsc.com/product-detail/C2935515.html
footprint 4032
pins: 1, 2

## RLM10FTSMR006
designator R?, comment 6mR
500mW 6mΩ ±50ppm/℃ ±1% 0805 Current Sense Resistors / Shunt Resistors ROHS; Manufacturer: TA-I Tech; Manufacturer Part Number: RLM10FTSMR006; Package: 0805; LCSC Part Number: C163092; Item Type: Resistor; ComponentLink1Description: LCSC; ComponentLink1URL: https://www.lcsc.com/product-detail/Current-Sense-Resistors-Shunt-Resistors_TA-I-Tech-RLM10FTSMR006_C163092.html
footprint RES-0805 (SMD 0805)
pins: 1, 2

## RLM20FECR050
designator R?, comment 50mR
1W 50mΩ Surface Mount Current Sensing Resistors ±50ppm/℃ ±1% 2010 Current Sense Resistors/Shunt Resistors ROHS; Manufacturer: TA-I Tech; Manufacturer Part Number: RLM20FECR050; Package: 2010; LCSC Part Number: C912938; Item Type: Shunt Resistor; ComponentLink1Description: LCSC; ComponentLink1URL: https://www.lcsc.com/product-detail/Current-Sense-Resistors-Shunt-Resistors_TA-I-Tech-RLM20FECR050_C912938.html
footprint RES-2010
pins: 1, 2

## RM04FTN8662
designator R49, comment 86.6K
62.5mW Thick Film Resistors 50V ±100ppm/℃ ±1% 86.6kΩ 0402 Chip Resistor - Surface Mount ROHS; Manufacturer: TA-I Tech; Manufacturer Part no: RM04FTN8662; Value: 86.6K; Package: 0402; ComponentLink1Description: JLCPCB; ComponentLink1URL: https://jlcpcb.com/kr/partdetail/ta_iTech-RM04FTN8662/C188001
footprint Res-0402
pins: 1, 2

## RMC04022K1%N
designator R?, comment 2K
62.5mW ±1% 2kΩ 0402 Chip Resistor - Surface Mount ROHS; Manufacturer: TyoHM; Manufacturer Part Number: RMC04022K1%N; LCSC Part Number: C325372; Item Type: Resistor; Value: 2K; ComponentLink1Description: LCSC; ComponentLink1URL: https://www.lcsc.com/product-detail/Chip-Resistor-Surface-Mount_TyoHM-RMC04022K1-N_C325372.html
footprint Res-0402
pins: 1, 2

## RMC040223.2K1%N
designator R?, comment 23.2K
23.2kΩ 62.5mW ±1% 0402 Chip Resistor - Surface Mount ROHS; Manufacturer: TyoHM; Manufacturer Part Number: RMC040223.2K1%N; Package: 0402; LCSC Part Number: C269399; Item Type: Resistor; ComponentLink1Description: LCSC; ComponentLink1URL: https://www.lcsc.com/product-detail/Chip-Resistor-Surface-Mount_TyoHM-RMC040223-2K1-N_C269399.html
footprint Res-0402
pins: 1, 2

## RMCF0402FT11K0
designator R?, comment 11k
Res Thick Film 0402 11K Ohm 1% 0.063W(1/16W) ±100ppm/C Pad SMD Automotive T/R; Manufacturer: Stackpole Electronics; Manufacturer Part Number: RMCF0402FT11K0; Value: 11kR; Max Power Dissipation: 63mW; Temperature Coefficient: 100ppm/°C; Supplier: Digikey; Supplier Part Number: RMCF0402FT11K0DKR-ND; RoHS: Yes; Category: Chip SMD Resistors; Stock: 3070; Pricing: 1=0.1, 10=0.021, 50=0.0116, 100=0.0093, 500=0.00594, 1000=0.005, 5000=0.00345 (USD); Mounting Technology: Surface Mount; Case/Package: 0402; Case Code (Metric): 1005; Case Code (Imperial): 0402; Contact Plating: Tin,Matte; Min Operating Temperature: -55°C; Max Operating Temperature: 155°C; Packaging: Tape and Reel; Tolerance: 1%; Number of Terminations: 2; Features: Automotive AEC-Q200; Series: RMCF; Length: 0.039inch; Width: 0.02inch; Height: 0.016inch; Ratings: AEC-Q200; Radiation Hardening: No; Lead Free: Lead Free; RoHS Compliant: Yes; ComponentLink1URL: http://components.arrow.com/part/dataview/50581462S9720773N1174?src-supplier=Arrow+Electronics; ComponentLink1Description: http://components.arrow.com/part/dataview/50581462S9720773N1174?src-supplier=Arrow+Electronics; ComponentLink2URL: https://www.seielect.com/catalog/SEI-RMCF_RMCP.pdf?src-supplier=Avnet; ComponentLink2Description: https://www.seielect.com/catalog/SEI-RMCF_RMCP.pdf?src-supplier=Avnet; ComponentLink3URL: https://www.seielect.com/catalog/SEI-Packaging.pdf?src-supplier=Digikey; ComponentLink3Description: https://www.seielect.com/catalog/SEI-Packaging.pdf?src-supplier=Digikey
footprint Res-0402
pins: 1, 2

## RMCF0805ZT0R00
designator R?, comment 0R
Res Thick Film 0805 0 Ohm Jumper 1/8W Molded SMD Paper T/R; Manufacturer: Stackpole Electronics; Manufacturer Part Number: RMCF0805ZT0R00; Power Rating: 125mW; Temperature Coefficient: 200ppm/°C; Voltage Rating: 150V; Item type: Resistor; Supplier: Digikey; Supplier Part Number: RMCF0805ZT0R00CT-ND; RoHS: Yes; Category: Chip SMD Resistors; Stock: 1094779; Pricing: 1=0.1, 10=0.017, 25=0.0128, 50=0.0096, 100=0.0068, 250=0.00544, 500=0.00436, 1000=0.00321 (USD); Mounting Technology: Surface Mount; Case/Package: 0805; Case Code (Metric): 2012; Case Code (Imperial): 0805; Contact Plating: Tin,Matte; Min Operating Temperature: -55°C; Max Operating Temperature: 155°C; Value: 0R; Packaging: Tape and Reel; Number of Terminations: 2; Max Power Dissipation: 125mW; Features: Automotive AEC-Q200; Series: RMCF; Construction: Rectangular; Length: 2mm; Width: 0.049inch; Height: 0.026inch; Depth: 1.25mm; Ratings: AEC-Q200; Radiation Hardening: No; Lead Free: Lead Free; Military Standard: Not; RoHS Compliant: Yes; ComponentLink1URL: https://datasheet.ciiva.com/15193/getdatasheetpartid-360417-15193658.pdf?src-supplier=Verical; ComponentLink1Description: https://datasheet.ciiva.com/15193/getdatasheetpartid-360417-15193658.pdf?src-supplier=Verical; Package: 0805
footprint RES-0805 (SMD 0805)
pins: 1, 2

## RN73H1ETTP80R6F50
designator R?, comment 80.6R
Res 80.6 Ohm 1% 1/16W 0402; Manufacturer: KOA Speer; Manufacturer Part Number: RN73H1ETTP80R6F50; Item Type: Resistor; Power Rating: 63mW; Voltage Rating: 50V; Temperature Coefficient: 50ppm/°C; Supplier: Digikey; Supplier Part Number: 2019-RN73H1ETTP80R6F50CT-ND; RoHS: Yes; Pricing: 1000=0.08675 (USD); Case/Package: 0402; Case Code (Imperial): 0402; Case Code (Metric): 1005; Weight: 2.3E-05oz; Min Operating Temperature: -55°C; Max Operating Temperature: 155°C; Value: 80.6R; Packaging: Tape and Reel; Tolerance: 1%; Termination: SMD/SMT; Voltage Rating (DC): 50V; Series: RN73H; Length: 1mm; Width: 0.5mm; Height: 0.35mm; RoHS Compliant: Yes; ComponentLink1URL: http://www.mouser.com/ds/2/219/RN73H-12200.pdf?src-supplier=Mouser; ComponentLink1Description: http://www.mouser.com/ds/2/219/RN73H-12200.pdf?src-supplier=Mouser
footprint Res-0402
pins: 1, 2

## RN73H1ETTP2800D50
designator R?, comment 280R
RES 280 OHM 0.5% 1/16W 0402; Manufacturer: KOA Speer; Manufacturer Part Number: RN73H1ETTP2800D50; Item Type: Resistor; Power Rating: 63mW; Voltage Rating: 50V; Temperature Coefficient: 50ppm/°C; Supplier: Digikey; Supplier Part Number: 2019-RN73H1ETTP2800D50CT-ND; RoHS: Yes; Pricing: 1000=0.08675 (USD); Case/Package: 0402; Case Code (Imperial): 0402; Case Code (Metric): 1005; Min Operating Temperature: -55°C; Max Operating Temperature: 155°C; Value: 280R; Packaging: Tape and Reel; Tolerance: 0.5%; Termination: SMD/SMT; Voltage Rating (DC): 50V; Series: RN73H; Length: 1mm; Width: 0.5mm; Height: 0.35mm; RoHS Compliant: Yes; ComponentLink1URL: http://www.koaspeer.com/catimages/Products/RN73H/RN73H.pdf?src-supplier=Mouser; ComponentLink1Description: http://www.koaspeer.com/catimages/Products/RN73H/RN73H.pdf?src-supplier=Mouser
footprint Res-0402
pins: 1, 2

## RN73H2BTTD3701B25
designator R?, comment 3.7K
RES 3.7K OHM 0.1% 1/4W 1206; Manufacturer: KOA Speer; Manufacturer Part Number: RN73H2BTTD3701B25; Item Type: Resistors; Power Dissipation: 250mW; Value: 3.7kΩ; Temperature Coefficient: 25ppm/°C; Voltage Rating (DC): 150V; Working Voltage: 200V; Supplier: DigiKey; LCSC Part Number: C4130598; RoHS: Compliant; Pricing: 5000=0.15125 (USD); Height: 600µm; Lifecycle Status: Production; Max Operating Temperature: 155°C; Min Operating Temperature: -55°C; Mounting Technology: Surface Mount; Number of Terminals: 2; REACH SVHC: Yes; Tolerance: 0.1%; Width: 1.6mm; ComponentLink1URL: https://datasheet.octopart.com:443/RN73H2BTTD3701B25-KOA-Speer-datasheet-182143700.pdf?src-supplier=IHS; ComponentLink1Description: https://datasheet.octopart.com:443/RN73H2BTTD3701B25-KOA-Speer-datasheet-182143700.pdf?src-supplier=IHS; ComponentLink2URL: http://sigma.octopart.com:80/rohs_statement/KOA-Speer-company-17.pdf?src-supplier=Compliance+Statements; ComponentLink2Description: http://sigma.octopart.com:80/rohs_statement/KOA-Speer-company-17.pdf?src-supplier=Compliance+Statements
footprint Res-1206
pins: 1, 2

## RNCF0402BTE40K0
designator R?, comment 40K
RES SMD 40K OHM 0.1% 1/10W 0402; Manufacturer: Stackpole Electronics; Manufacturer Part Number: RNCF0402BTE40K0; Item Type: Chip SMD Resistors; Supplier: Digikey; Supplier Part Number: 738-RNCF0402BTE40K0CT-ND; RoHS: Yes; Stock: 8442; Pricing: 1=0.16, 10=0.12, 50=0.0946, 100=0.0846, 500=0.06416, 1000=0.05662, 5000=0.04184 (USD); ComponentLink1URL: http://datasheet.octopart.com/RNCF0402BTE40K0-Stackpole-Electronics-datasheet-12511394.pdf?src-supplier=Digikey; ComponentLink1Description: http://datasheet.octopart.com/RNCF0402BTE40K0-Stackpole-Electronics-datasheet-12511394.pdf?src-supplier=Digikey; ComponentLink2URL: http://datasheet.octopart.com/RNCF0402BTE40K0-Stackpole-Electronics-datasheet-12511394.pdf?src-supplier=NAC+Semi; ComponentLink2Description: http://datasheet.octopart.com/RNCF0402BTE40K0-Stackpole-Electronics-datasheet-12511394.pdf?src-supplier=NAC+Semi; ComponentLink3URL: https://datasheet.octopart.com/RNCF0402BTE40K0-Stackpole-Electronics-datasheet-154799225.pdf?src-supplier=Master+Electronics; ComponentLink3Description: https://datasheet.octopart.com/RNCF0402BTE40K0-Stackpole-Electronics-datasheet-154799225.pdf?src-supplier=Master+Electronics
footprint Res-0402
pins: 1, 2

## RNCF1206DTE374K
designator R?, comment 374K
RES SMD 374K OHM 0.5% 1/4W 1206; Manufacturer: Stackpole Electronics; Manufacturer Part Number: RNCF1206DTE374K; Item Type: Resistors; Value: 374kR; Max Power Dissipation: 250mW; Temperature Coefficient: 25ppm/°C; Supplier: Digikey; LCSC Part Number: C346652; RoHS: Yes; Pricing: 5000=0.03682 (USD); Mounting Technology: Surface Mount; Case/Package: 1206; Case Code (Metric): 3216; Case Code (Imperial): 1206; Min Operating Temperature: -55°C; Max Operating Temperature: 155°C; Tolerance: 0.5%; Packaging: Cut Tape; Number of Terminations: 2; Features: Moisture Resistant; Series: RNCF; Length: 0.126inch; Width: 0.063inch; Height: 0.026inch; RoHS Compliant: Yes; ComponentLink1URL: https://www.seielect.com/Catalog/SEI-RNCF.pdf?src-supplier=Digikey; ComponentLink1Description: https://www.seielect.com/Catalog/SEI-RNCF.pdf?src-supplier=Digikey
footprint Res-1206
pins: 1, 2

## RNCS0603BKE10K0
designator R?
Res Thin Film 0603 10K Ohm 0.1% 0.063W(1/16W) ±25ppm/C Pad SMD Automotive T/R; Manufacturer: Stackpole Electronics; Manufacturer Part Number: RNCS0603BKE10K0; Value: 10kR; Temperature Coefficient: 25ppm/°C; Max Power Dissipation: 63mW; Supplier: Digikey; Supplier Part Number: RNCS0603BKE10K0CT-ND; RoHS: Yes; Category: Chip SMD Resistors; Stock: 21197; Pricing: 1=0.26, 10=0.191, 50=0.149, 100=0.133, 500=0.10048 (USD); Mounting Technology: Surface Mount; Case/Package: 0603; Contact Plating: Tin,Matte; Case Code (Metric): 1608; Case Code (Imperial): 0603; Min Operating Temperature: -55°C; Max Operating Temperature: 155°C; Tolerance: 0.1%; Packaging: Tape and Reel; Number of Terminations: 2; Features: Moisture Resistant,Automotive AEC-Q200; Series: RNCS; Length: 0.061inch; Width: 0.031inch; Height: 0.022inch; Radiation Hardening: No; Lead Free: Lead Free; RoHS Compliant: Yes; ComponentLink1URL: https://datasheet.ciiva.com/2479/sei-rncs-rnch-2479443.pdf?src-supplier=Digikey; ComponentLink1Description: https://datasheet.ciiva.com/2479/sei-rncs-rnch-2479443.pdf?src-supplier=Digikey; ComponentLink2URL: https://datasheet.ciiva.com/2479/sei-rncs-rnch-2479444.pdf?src-supplier=Digikey; ComponentLink2Description: https://datasheet.ciiva.com/2479/sei-rncs-rnch-2479444.pdf?src-supplier=Digikey
footprint Res-0603
pins: 1, 2

## RS-05L2R00FT
designator R?, comment 2R
125mW Thick Film Resistors 150V ±1% ±250ppm/℃ 2Ω 0805 Chip Resistor - Surface Mount ROHS; Manufacturer: FH (Guangdong Fenghua Advanced Tech); Manufacturer Part Number: RS-05L2R00FT; Package: 0805; LCSC Part Number: C304864; Item Type: Resistor; ComponentLink1Description: LCSC; ComponentLink1URL: https://www.lcsc.com/product-detail/Chip-Resistor-Surface-Mount_FH-Guangdong-Fenghua-Advanced-Tech-RS-05L2R00FT_C304864.html
footprint RES-0805 (SMD 0805)
pins: 1, 2

## RSF100JB-73-10R
designator R?, comment 10R
RES 10 OHM 5% 1W AXIAL; Manufacturer: Yageo; Manufacturer Part Number: RSF100JB-73-10R; Item Type: Through Hole Resistor; Supplier: Arrow Electronics; Supplier Part Number: RSF100JB-73-10R; RoHS: Yes; Category: Through-Hole Resistors; Stock: 8702; Pricing: 1=0.299, 10=0.1424, 25=0.141, 50=0.1277, 100=0.0646, 250=0.064, 500=0.0555, 1000=0.0313, 5000=0.031 (USD); ComponentLink1URL: https://datasheet.ciiva.com/2714/yageolr-rsf-2013-2714928.pdf?src-supplier=Digi-Key; ComponentLink1Description: https://datasheet.ciiva.com/2714/yageolr-rsf-2013-2714928.pdf?src-supplier=Digi-Key; LCSC Part Number: C1381524
footprint RSF100JB-73-10R
pins: 1, 2

## RT0402BRC076K8L
designator R?, comment 6.8K
RES SMD 6.8K OHM 0.1% 1/16W 0402; Manufacturer: Yageo; Manufacturer Part Number: RT0402BRC076K8L; Item Type: Resistors; Value: 6.8kR; Max Power Dissipation: 63mW; Temperature Coefficient: 15ppm/°C; Supplier: Digikey; LCSC Part Number: C852943; RoHS: Yes; Stock: 20494; Pricing: 1=0.51, 10=0.36, 50=0.279, 100=0.2487, 500=0.18748, 1000=0.16452, 5000=0.14066 (USD); Case/Package: 0402; Min Operating Temperature: -55°C; Max Operating Temperature: 155°C; Packaging: Tape and Reel; Number of Terminations: 2; Tolerance: 0.1%; Features: Moisture Resistant; Series: RT; Length: 0.039inch; Width: 0.02inch; Height: 0.014inch; RoHS Compliant: Yes
footprint Res-0402
pins: 1, 2

## RT0402BRD071K6L
designator R?, comment 1.6K
RES SMD 1.6K OHM 0.1% 1/16W 0402; Manufacturer: Yageo; Manufacturer Part Number: RT0402BRD071K6L; Resistance: 1.6kR; Power Rating: 62.5mW; Voltage Rating: 50V; Temperature Coefficient: 25ppm/°C; Max Power Dissipation: 63mW; Item Type: Resistor; Supplier 1: Digi-Key; RoHS: Yes; Category: Chip SMD Resistors; Stock 1: 20555; Pricing 1: 1=0.40000, 10=0.33600, 100=0.13130, 500=0.07938, 1000=0.05496, 2500=0.05038, 5000=0.04580 (USD); Case/Package: 0402; Case Code (Imperial): 0402; Case Code (Metric): 1005; Weight: 2.3E-05oz; Min Operating Temperature: -55°C; Max Operating Temperature: 125°C; Packaging: Tape and Reel; Tolerance: 0.1%; Package Quantity: 10000; Resistor Type: Thin Film; Termination: SMD/SMT; Number of Terminations: 2; Voltage Rating (DC): 50V; Series: RT; Length: 0.039inch; Width: 0.5mm; Height: 0.014inch; Lead Free: Lead Free; RoHS Compliant: Yes; ComponentLink1URL: https://datasheet.ciiva.com/2582/pyu-rt-1-to-0-05-rohs-l-5-2582211.pdf?src-supplier=Digi-Key; ComponentLink1Description: https://datasheet.ciiva.com/2582/pyu-rt-1-to-0-05-rohs-l-5-2582211.pdf?src-supplier=Digi-Key; LCSC Part Number: C852616; Supplier Part Number 1: YAG4199CT-ND
footprint Res-0402
pins: 1, 2

## RT0402BRD071K18L
designator R?, comment 1.18K
RES SMD 1.18KOHM 0.1% 1/16W 0402; Manufacturer: Yageo; Manufacturer Part Number: RT0402BRD071K18L; Item Type: Resistors; Supplier: Avnet; LCSC Part Number: C852601; RoHS: Yes; Stock: 10000; Pricing: 10000=0.01384 (USD); ComponentLink1URL: https://datasheet.ciiva.com/2582/pyu-rt-1-to-0-05-rohs-l-4-2582193.pdf?src-supplier=Digikey; ComponentLink1Description: https://datasheet.ciiva.com/2582/pyu-rt-1-to-0-05-rohs-l-4-2582193.pdf?src-supplier=Digikey; ComponentLink2URL: https://datasheet.ciiva.com/46635/pyu-rt-1-to-0-05-rohs-l-5-46635161.pdf?src-supplier=Digikey; ComponentLink2Description: https://datasheet.ciiva.com/46635/pyu-rt-1-to-0-05-rohs-l-5-46635161.pdf?src-supplier=Digikey
footprint Res-0402
pins: 1, 2